# Altium schematic symbol library Dlib.SchLib: 73 symbols
Pins are listed as number, name and electrical type; pins without a type are passive.

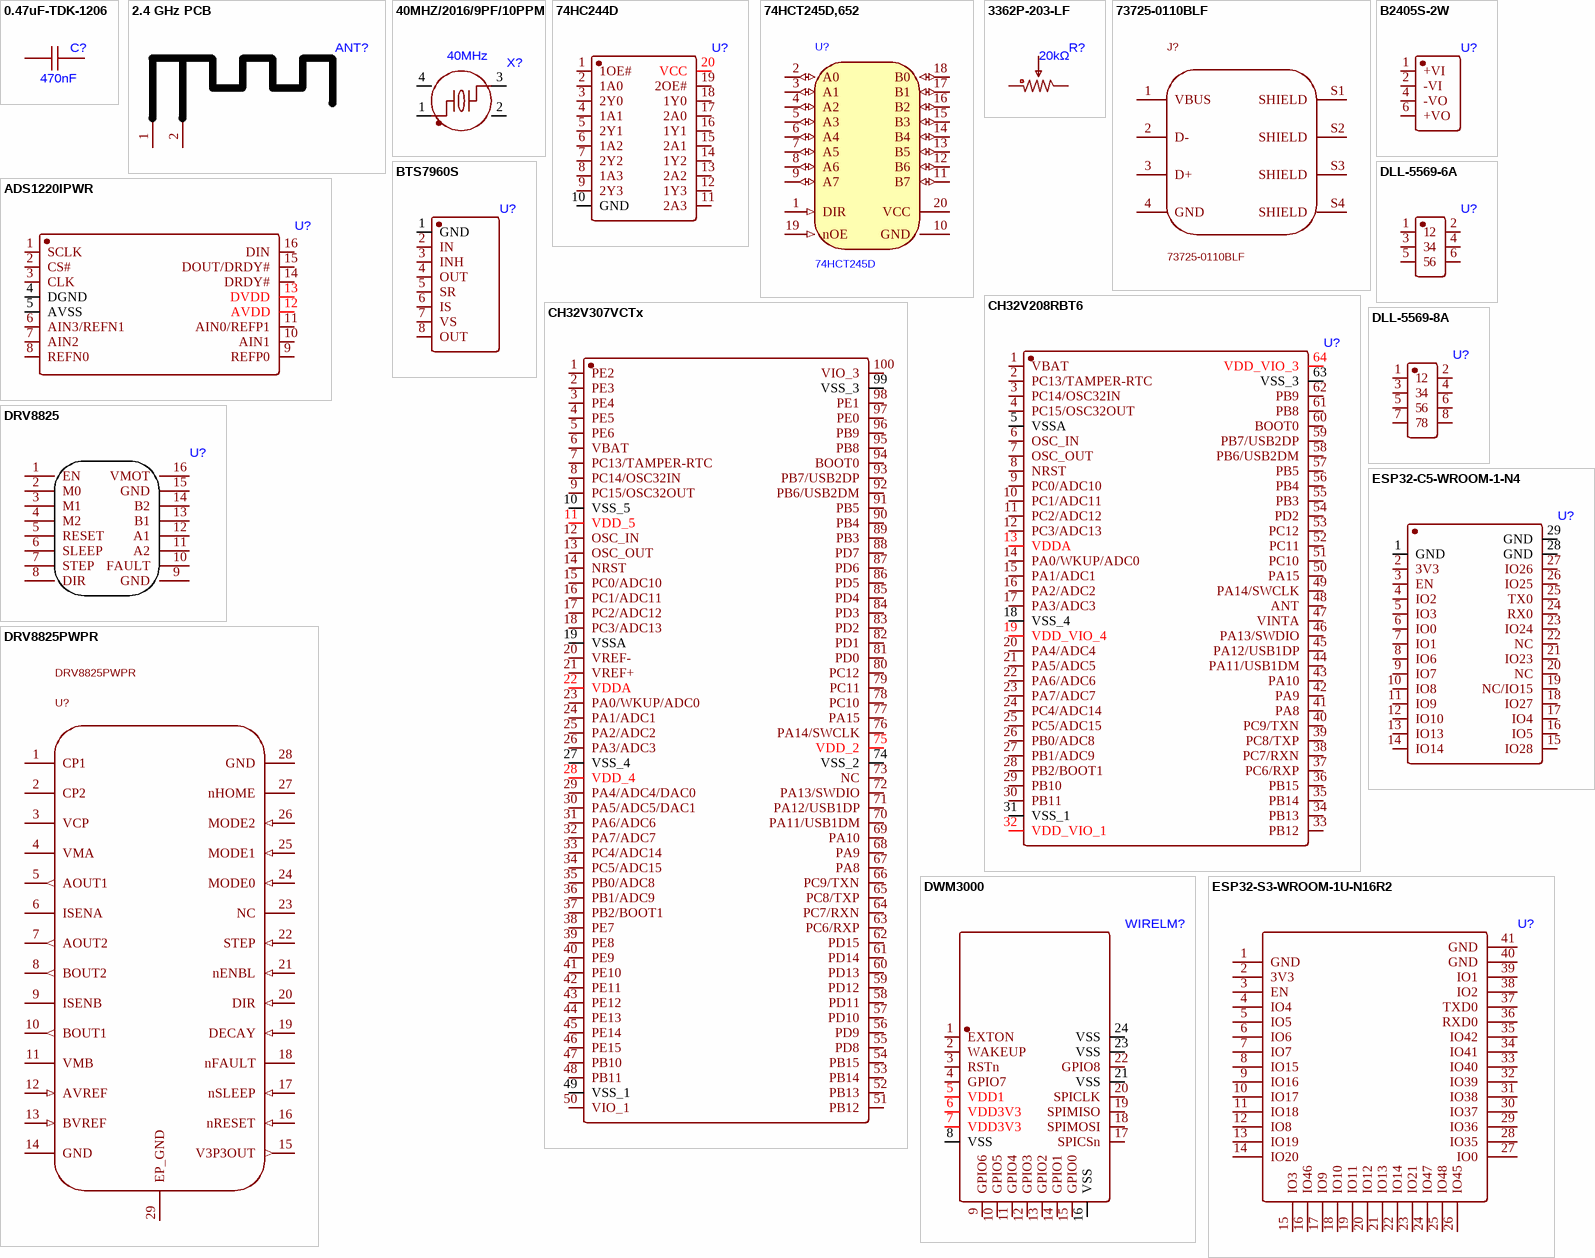
[diagram p0: symbols 0.47uF-TDK-1206 to ESP32-S3-WROOM-1U-N16R2]

## 0.47uF-TDK-1206
designator C?, comment 470nF
footprint C1206
pins: 1, 2

## 2.4 GHz PCB
designator ANT?
footprint 2.4 GHZ PCB ANTENA
pins: 1, 2

## 40MHZ/2016/9PF/10PPM
designator X?, comment 40MHz
footprint CRYSTAL-SMD_4P-L2.0-W1.6-BL
pins: 1, 2 GND, 3, 4 GND

## 74HC244D
designator U?
footprint SOIC-20_L12.8-W7.5-P1.27-LS10.3-TL
pins: 1 1OE#, 2 1A0, 3 2Y0, 4 1A1, 5 2Y1, 6 1A2, 7 2Y2, 8 1A3, 9 2Y3, 10 GND, 11 2A3, 12 1Y3, 13 2A2, 14 1Y2, 15 2A1, 16 1Y1, 17 2A0, 18 1Y0, 19 2OE#, 20 VCC

## 74HCT245D,652
designator U?, comment 74HCT245D
Nexperia 74HCT245D,652; 8-bit bidirectional non-inverting bus transceiver, 3-state, TTL inputs, SO20 wide; Logic Family: 74HCT; TTL-compatible inputs; Supply Voltage: 4.5-5.5 V; Function: 8-bit non-inverting bidirectional bus transceiver; 3-state; Direction: DIR=HIGH: A to B; DIR=LOW: B to A; nOE=HIGH: high impedance; 3D Model: Existing embedded SOIC-20 wide model shared with 74HC244D; Package Body: 12.8 x 7.5 mm; pitch 1.27 mm; Manufacturer: Nexperia; Manufacturer Part Number: 74HCT245D,652; Package: SO20 / SOIC-20 wide / SOT163-1; Datasheet: https://assets.nexperia.com/documents/data-sheet/74HC_HCT245.pdf; ComponentLink1Description: Nexperia datasheet; ComponentLink1URL: https://assets.nexperia.com/documents/data-sheet/74HC_HCT245.pdf; Product URL: https://www.thegioiic.com/74hct245d-652-ic-bus-transceiver-non-inverting-8-bit-3-state-20-soic
footprint SOIC-20_L12.8-W7.5-P1.27-LS10.3-TL
pins: 1 DIR (in), 2 A0 (io), 3 A1 (io), 4 A2 (io), 5 A3 (io), 6 A4 (io), 7 A5 (io), 8 A6 (io), 9 A7 (io), 10 GND (power), 11 B7 (io), 12 B6 (io), 13 B5 (io), 14 B4 (io), 15 B3 (io), 16 B2 (io), 17 B1 (io), 18 B0 (io), 19 nOE (in), 20 VCC (power)

## 3362P-203-LF
designator R?, comment 20kΩ
footprint RES-ADJ-TH_3P-L7.0-W6.8_3362P
pins: 1, 2, 3

## 73725-0110BLF
designator J?
USB 2.0 Type-A receptacle, upright right-angle, through-hole, 4 contacts and 4 shield stakes; Manufacturer: Amphenol Communications Solutions (FCI); USB Version: USB 2.0 Type A receptacle; Contact Tail Length: 2.29 mm; Recommended PCB Thickness: 1.00-1.60 mm; Shield Pads: S1-S4 are four electrically common shell stakes; library-assigned labels; Application Note: Exact footprint for 73725-0110BLF. Photo similarity does not establish interchangeability. No PCB edge cut is included.; Manufacturer Part Number: 73725-0110BLF; Package: USB-A upright right-angle through-hole; Datasheet: https://cdn.amphenol-cs.com/media/wysiwyg/files/drawing/73725.pdf; ComponentLink1Description: Amphenol drawing 73725 Rev AL1, sheet 2; ComponentLink1URL: https://cdn.amphenol-cs.com/media/wysiwyg/files/drawing/73725.pdf; Product URL: https://www.amphenol-cs.com/product/737250110blf.html; Mounting: Upright / right-angle / THT / hold-down style A; Housing: White; without sensor contact; Footprint Origin: Center between front shell stakes; connector mating face at Y=-11.76 mm
footprint USB_A_UPRIGHT_73725-0110BLF
pins: 1 VBUS, 2 D-, 3 D+, 4 GND, S1 SHIELD, S2 SHIELD, S3 SHIELD, S4 SHIELD

## ADS1220IPWR
designator U?
footprint TSSOP-16_L5.0-W4.4-P0.65-LS6.4-BL
pins: 1 SCLK, 2 CS#, 3 CLK, 4 DGND, 5 AVSS, 6 AIN3/REFN1, 7 AIN2, 8 REFN0, 9 REFP0, 10 AIN1, 11 AIN0/REFP1, 12 AVDD, 13 DVDD, 14 DRDY#, 15 DOUT/DRDY#, 16 DIN

## B2405S-2W
designator U?
footprint PWRM-TH_IB2405S-2W
pins: 1 +VI, 2 -VI, 4 -VO, 6 +VO

## BTS7960S
designator U?
footprint PG-TO263-7_L9.9-W9.2-P1.27-LS14.9-BR
pins: 1 GND, 2 IN, 3 INH, 4 OUT, 5 SR, 6 IS, 7 VS, 8 OUT

## CH32V208RBT6
designator U?
footprint LQFP-64_L10.0-W10.0-P0.50-LS12.0-BL
pins: 1 VBAT, 2 PC13/TAMPER-RTC, 3 PC14/OSC32IN, 4 PC15/OSC32OUT, 5 VSSA, 6 OSC_IN, 7 OSC_OUT, 8 NRST, 9 PC0/ADC10, 10 PC1/ADC11, 11 PC2/ADC12, 12 PC3/ADC13, 13 VDDA, 14 PA0/WKUP/ADC0, 15 PA1/ADC1, 16 PA2/ADC2, 17 PA3/ADC3, 18 VSS_4, 19 VDD_VIO_4, 20 PA4/ADC4, 21 PA5/ADC5, 22 PA6/ADC6, 23 PA7/ADC7, 24 PC4/ADC14, 25 PC5/ADC15, 26 PB0/ADC8, 27 PB1/ADC9, 28 PB2/BOOT1, 29 PB10, 30 PB11, 31 VSS_1, 32 VDD_VIO_1, 33 PB12, 34 PB13, 35 PB14, 36 PB15, 37 PC6/RXP, 38 PC7/RXN, 39 PC8/TXP, 40 PC9/TXN, 41 PA8, 42 PA9, 43 PA10, 44 PA11/USB1DM, 45 PA12/USB1DP, 46 PA13/SWDIO, 47 VINTA, 48 ANT, 49 PA14/SWCLK, 50 PA15, 51 PC10, 52 PC11, 53 PC12, 54 PD2, 55 PB3, 56 PB4, 57 PB5, 58 PB6/USB2DM, 59 PB7/USB2DP, 60 BOOT0, 61 PB8, 62 PB9, 63 VSS_3, 64 VDD_VIO_3

## CH32V307VCTx
designator U?
footprint LQFP-100_L14.0-W14.0-P0.50-LS16.0-BL
pins: 1 PE2, 2 PE3, 3 PE4, 4 PE5, 5 PE6, 6 VBAT, 7 PC13/TAMPER-RTC, 8 PC14/OSC32IN, 9 PC15/OSC32OUT, 10 VSS_5, 11 VDD_5, 12 OSC_IN, 13 OSC_OUT, 14 NRST, 15 PC0/ADC10, 16 PC1/ADC11, 17 PC2/ADC12, 18 PC3/ADC13, 19 VSSA, 20 VREF-, 21 VREF+, 22 VDDA, 23 PA0/WKUP/ADC0, 24 PA1/ADC1, 25 PA2/ADC2, 26 PA3/ADC3, 27 VSS_4, 28 VDD_4, 29 PA4/ADC4/DAC0, 30 PA5/ADC5/DAC1, 31 PA6/ADC6, 32 PA7/ADC7, 33 PC4/ADC14, 34 PC5/ADC15, 35 PB0/ADC8, 36 PB1/ADC9, 37 PB2/BOOT1, 38 PE7, 39 PE8, 40 PE9, 41 PE10, 42 PE11, 43 PE12, 44 PE13, 45 PE14, 46 PE15, 47 PB10, 48 PB11, 49 VSS_1, 50 VIO_1, 51 PB12, 52 PB13, 53 PB14, 54 PB15, 55 PD8, 56 PD9, 57 PD10, 58 PD11, 59 PD12, 60 PD13, 61 PD14, 62 PD15, 63 PC6/RXP, 64 PC7/RXN, 65 PC8/TXP, 66 PC9/TXN, 67 PA8, 68 PA9, 69 PA10, 70 PA11/USB1DM, 71 PA12/USB1DP, 72 PA13/SWDIO, 73 NC, 74 VSS_2, 75 VDD_2, 76 PA14/SWCLK, 77 PA15, 78 PC10, 79 PC11, 80 PC12, 81 PD0, 82 PD1, 83 PD2, 84 PD3, 85 PD4, 86 PD5, 87 PD6, 88 PD7, 89 PB3, 90 PB4, 91 PB5, 92 PB6/USB2DM, 93 PB7/USB2DP, 94 BOOT0, 95 PB8, 96 PB9, 97 PE0, 98 PE1, 99 VSS_3, 100 VIO_3

## DLL-5569-6A
designator U?
footprint CONN-TH_DLL-5569-6A
pins: 1, 2, 3, 4, 5, 6

## DLL-5569-8A
designator U?
footprint CONN-TH_DLL-5569-8A
pins: 1, 2, 3, 4, 5, 6, 7, 8

## DRV8825
designator U?
footprint DRV8825
footprint DRV8825
pins: 1 EN, 2 M0, 3 M1, 4 M2, 5 RESET, 6 SLEEP, 7 STEP, 8 DIR, 9 GND, 10 FAULT, 11 A2, 12 A1, 13 B1, 14 B2, 15 GND, 16 VMOT

## DRV8825PWPR
designator U?
Manufacturer: Texas Instruments; Supply Voltage: 8.2-45 V; Maximum Drive Current: 2.5 A (thermal conditions apply); Thermal Pad: Pin 29 = exposed pad; connect to GND; add thermal vias in PCB layout; Manufacturer Part Number: DRV8825PWPR; Package: HTSSOP-28 PowerPAD (PWP); Datasheet: https://www.ti.com/lit/ds/symlink/drv8825.pdf; Supplier: The Gioi IC; Supplier URL: https://www.thegioiic.com/drv8825pwpr-ic-dieu-khien-dong-co-buoc-2-5a-28-htssop; Footprint Variants: Default PWP0028C; alternate PWP0028V. Match actual TI package variant.
footprint TI_PWP0028C_DRV8825
footprint TI_PWP0028V_DRV8825
pins: 1 CP1, 2 CP2, 3 VCP, 4 VMA (power), 5 AOUT1 (out), 6 ISENA, 7 AOUT2 (out), 8 BOUT2 (out), 9 ISENB, 10 BOUT1 (out), 11 VMB (power), 12 AVREF (in), 13 BVREF (in), 14 GND (power), 15 V3P3OUT (out), 16 nRESET (in), 17 nSLEEP (in), 18 nFAULT (oc), 19 DECAY (in), 20 DIR (in), 21 nENBL (in), 22 STEP (in), 23 NC, 24 MODE0 (in), 25 MODE1 (in), 26 MODE2 (in), 27 nHOME (oc), 28 GND (power), 29 EP_GND (power)

## DWM3000
designator WIRELM?
footprint WIRELM-SMD_DWM3000
pins: 1 EXTON, 2 WAKEUP, 3 RSTn, 4 GPIO7, 5 VDD1, 6 VDD3V3, 7 VDD3V3, 8 VSS, 9 GPIO6, 10 GPIO5, 11 GPIO4, 12 GPIO3, 13 GPIO2, 14 GPIO1, 15 GPIO0, 16 VSS, 17 SPICSn, 18 SPIMOSI, 19 SPIMISO, 20 SPICLK, 21 VSS, 22 GPIO8, 23 VSS, 24 VSS

## ESP32-C5-WROOM-1-N4
designator U?
footprint COMM-SMD_ESP32-C5-WROOM-1-N4
pins: 1 GND, 2 3V3, 3 EN, 4 IO2, 5 IO3, 6 IO0, 7 IO1, 8 IO6, 9 IO7, 10 IO8, 11 IO9, 12 IO10, 13 IO13, 14 IO14, 15 IO28, 16 IO5, 17 IO4, 18 IO27, 19 NC/IO15, 20 NC, 21 IO23, 22 NC, 23 IO24, 24 RX0, 25 TX0, 26 IO25, 27 IO26, 28 GND, 29 GND

## ESP32-S3-WROOM-1U-N16R2
designator U?
footprint WIRELM-SMD_ESP32-S3-WROOM-1U
pins: 1 GND, 2 3V3, 3 EN, 4 IO4, 5 IO5, 6 IO6, 7 IO7, 8 IO15, 9 IO16, 10 IO17, 11 IO18, 12 IO8, 13 IO19, 14 IO20, 15 IO3, 16 IO46, 17 IO9, 18 IO10, 19 IO11, 20 IO12, 21 IO13, 22 IO14, 23 IO21, 24 IO47, 25 IO48, 26 IO45, 27 IO0, 28 IO35, 29 IO36, 30 IO37, 31 IO38, 32 IO39, 33 IO40, 34 IO41, 35 IO42, 36 RXD0, 37 TXD0, 38 IO2, 39 IO1, 40 GND, 41 GND

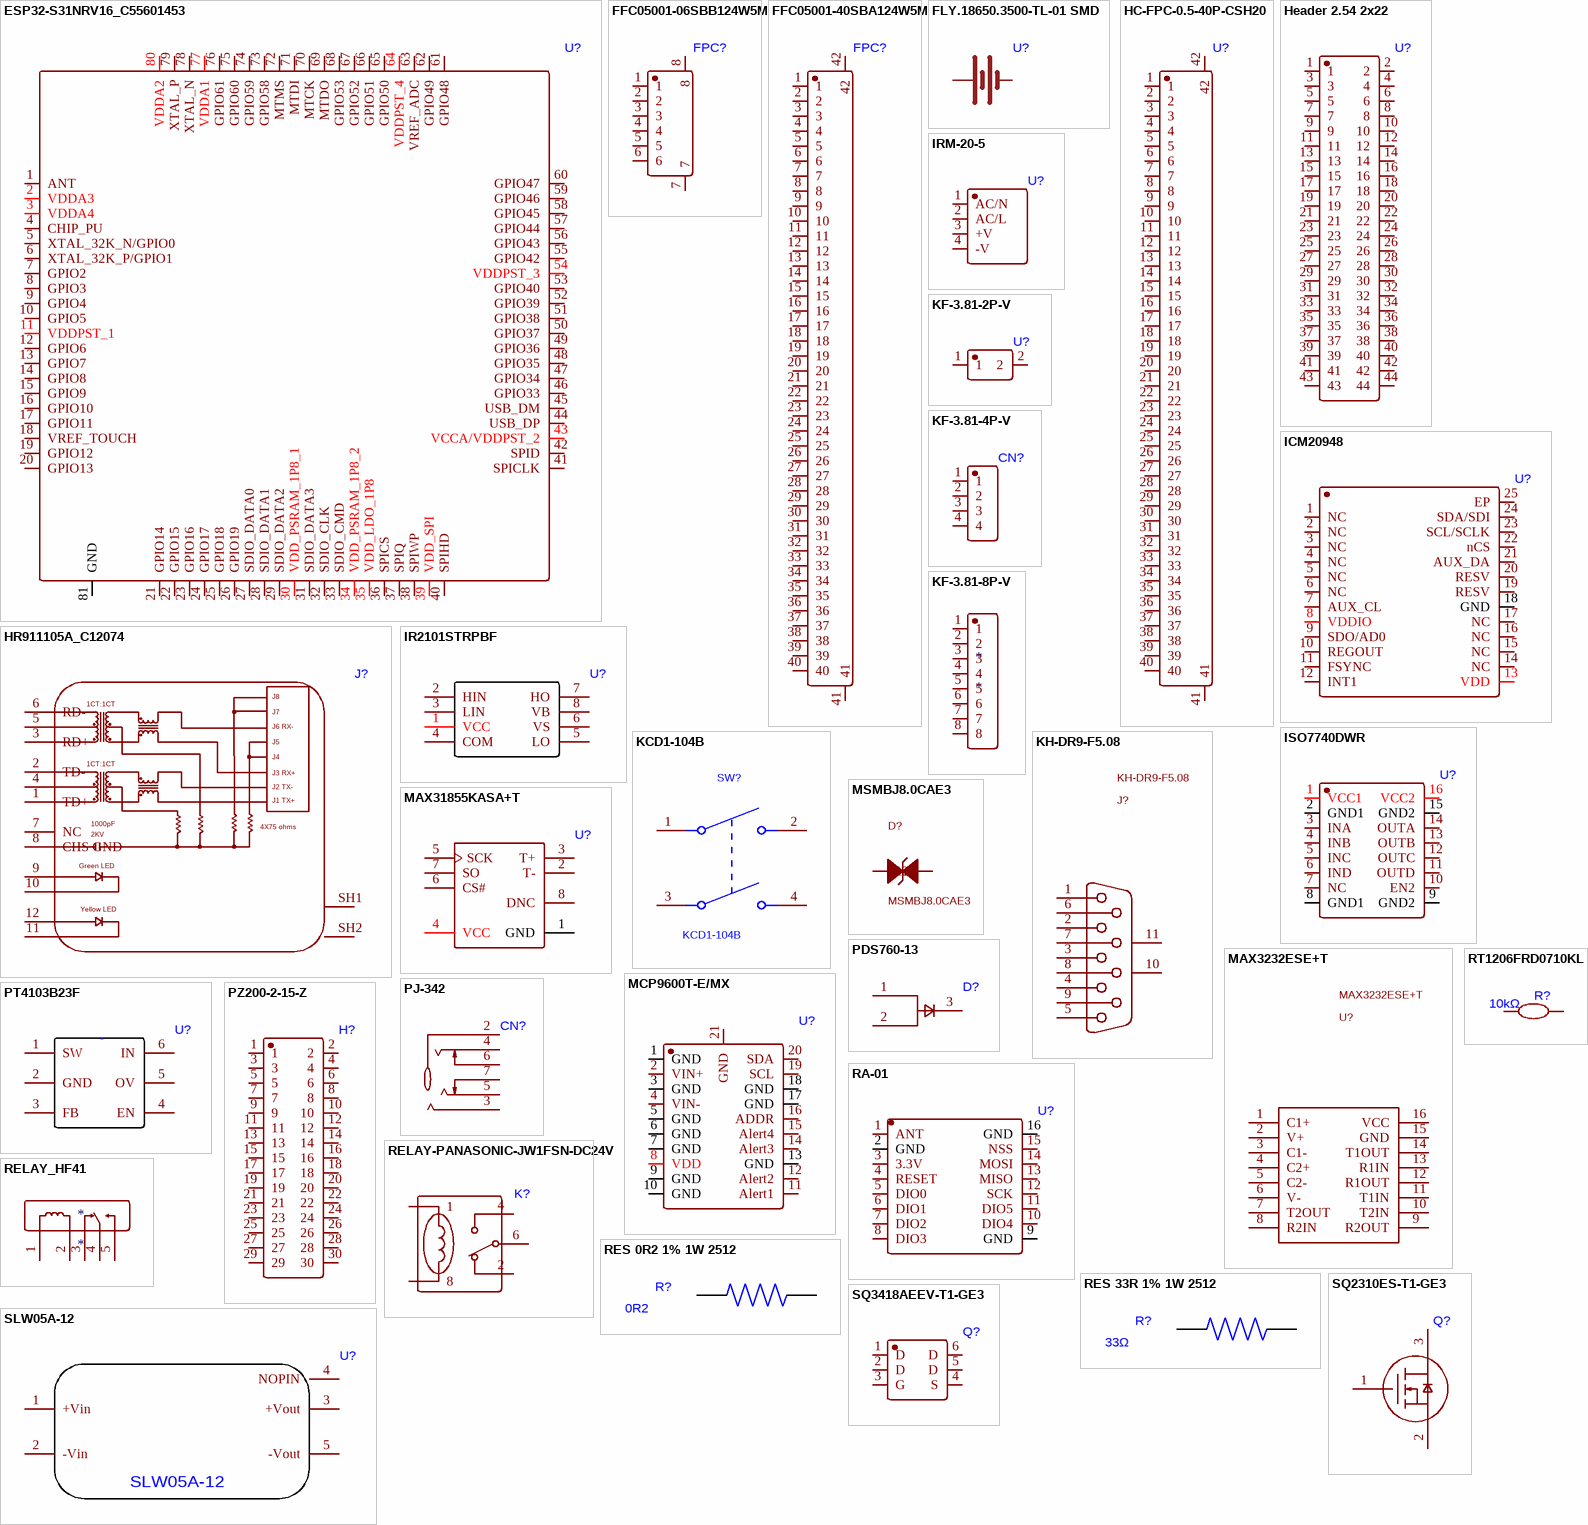
[diagram p1: symbols ESP32-S31NRV16_C55601453 to SQ3418AEEV-T1-GE3]

## ESP32-S31NRV16_C55601453
designator U?
footprint QFN-80_L8.0-W8.0-P0.35-BL-EP6.5
pins: 1 ANT, 2 VDDA3, 3 VDDA4, 4 CHIP_PU, 5 XTAL_32K_N/GPIO0, 6 XTAL_32K_P/GPIO1, 7 GPIO2, 8 GPIO3, 9 GPIO4, 10 GPIO5, 11 VDDPST_1, 12 GPIO6, 13 GPIO7, 14 GPIO8, 15 GPIO9, 16 GPIO10, 17 GPIO11, 18 VREF_TOUCH, 19 GPIO12, 20 GPIO13, 21 GPIO14, 22 GPIO15, 23 GPIO16, 24 GPIO17, 25 GPIO18, 26 GPIO19, 27 SDIO_DATA0, 28 SDIO_DATA1, 29 SDIO_DATA2, 30 VDD_PSRAM_1P8_1, 31 SDIO_DATA3, 32 SDIO_CLK, 33 SDIO_CMD, 34 VDD_PSRAM_1P8_2, 35 VDD_LDO_1P8, 36 SPICS, 37 SPIQ, 38 SPIWP, 39 VDD_SPI, 40 SPIHD, 41 SPICLK, 42 SPID, 43 VCCA/VDDPST_2, 44 USB_DP, 45 USB_DM, 46 GPIO33, 47 GPIO34, 48 GPIO35, 49 GPIO36, 50 GPIO37, 51 GPIO38, 52 GPIO39, 53 GPIO40, 54 VDDPST_3, 55 GPIO42, 56 GPIO43, 57 GPIO44, 58 GPIO45, 59 GPIO46, 60 GPIO47, 61 GPIO48, 62 GPIO49, 63 VREF_ADC, 64 VDDPST_4, 65 GPIO50, 66 GPIO51, 67 GPIO52, 68 GPIO53, 69 MTDO, 70 MTCK, 71 MTDI, 72 MTMS, 73 GPIO58, 74 GPIO59, 75 GPIO60, 76 GPIO61, 77 VDDA1, 78 XTAL_N, 79 XTAL_P, 80 VDDA2, 81 GND

## FFC05001-06SBB124W5M
designator FPC?
footprint FFC-SMD_FFC05001-06SBB124W5M
pins: 1, 2, 3, 4, 5, 6, 7, 8

## FFC05001-40SBA124W5M
designator FPC?
footprint FFC-SMD_FFC05001-40SBA124W5M
pins: 1, 2, 3, 4, 5, 6, 7, 8, 9, 10, 11, 12, 13, 14, 15, 16, 17, 18, 19, 20, 21, 22, 23, 24, 25, 26, 27, 28, 29, 30, 31, 32, 33, 34, 35, 36, 37, 38, 39, 40, 41, 42

## FLY.18650.3500-TL-01 SMD
designator U?
footprint BAT-SMD_FLY.18650.3500-TL-01
pins: 1 +, 2 -

## HC-FPC-0.5-40P-CSH20
designator U?
footprint FPC-SMD_40P-P0.50_HC-FPC-0.5-40P-CSH20
pins: 1, 2, 3, 4, 5, 6, 7, 8, 9, 10, 11, 12, 13, 14, 15, 16, 17, 18, 19, 20, 21, 22, 23, 24, 25, 26, 27, 28, 29, 30, 31, 32, 33, 34, 35, 36, 37, 38, 39, 40, 41, 42

## Header 2.54 2x22
designator U?
footprint HDR-TH_44P-P2.54-V-M-R2-C22-S2.54
pins: 1, 2, 3, 4, 5, 6, 7, 8, 9, 10, 11, 12, 13, 14, 15, 16, 17, 18, 19, 20, 21, 22, 23, 24, 25, 26, 27, 28, 29, 30, 31, 32, 33, 34, 35, 36, 37, 38, 39, 40, 41, 42, 43, 44

## HR911105A_C12074
designator J?
footprint RJ45-TH_HR911105A
pins: 1 TD+, 2 TD-, 3 RD+, 4, 5, 6 RD-, 7 NC, 8 CHS GND, 9, 10, 11, 12, SH1, SH2
text: J8; 1CT:1CT; J7; J6 RX-; J5; J4; J3 RX+; J2 TX-; J1 TX+; 1000pF; 4X75 ohms; 2KV; Green LED; Yellow LED

## ICM20948
designator U?
footprint QFN-24_L3.0-W3.0-P0.40-BL-EP
pins: 1 NC, 2 NC, 3 NC, 4 NC, 5 NC, 6 NC, 7 AUX_CL, 8 VDDIO, 9 SDO/AD0, 10 REGOUT, 11 FSYNC, 12 INT1, 13 VDD, 14 NC, 15 NC, 16 NC, 17 NC, 18 GND, 19 RESV, 20 RESV, 21 AUX_DA, 22 nCS, 23 SCL/SCLK, 24 SDA/SDI, 25 EP

## IR2101STRPBF
designator U?
footprint SOIC-8_L5.0-W4.0-P1.27-LS6.0-BL
pins: 1 VCC, 2 HIN, 3 LIN, 4 COM, 5 LO, 6 VS, 7 HO, 8 VB

## IRM-20-5
designator U?
footprint PWRM-TH_IRM-20-XX
pins: 1 AC/N, 2 AC/L, 3 +V, 4 -V

## ISO7740DWR
designator U?
footprint SOIC-16_L10.3-W7.5-P1.27-LS10.3-BL
pins: 1 VCC1, 2 GND1, 3 INA, 4 INB, 5 INC, 6 IND, 7 NC, 8 GND1, 9 GND2, 10 EN2, 11 OUTD, 12 OUTC, 13 OUTB, 14 OUTA, 15 GND2, 16 VCC2

## KCD1-104B
designator SW?
KCD1-104B / KCD117, 4-pin DPST ON-OFF right-angle rocker; simplified visual 3D; Manufacturer: Generic / OEM; Function: DPST ON-OFF, non-illuminated; 3D Model: Simplified similar-shape CAD; not manufacturer CAD; Pin Assignment: Library assigned: contacts 1-2 and 3-4, mechanically linked; verify actual switch continuity; Reference Terminal Grid: 10 x 5 mm; Reference Bezel: 21 x 15 mm; Part Number: KCD1-104B / KCD117; Product URL: https://www.thegioiic.com/kcd1-104b-kcd117-cong-tac-bap-benh-on-off-mau-den-4-chan-cong-6a; Footprint Status: Visual reference only; OEM geometry and pin assignment not verified
footprint KCD1_104B_4PIN_RA_VISUAL_REF
pins: 1 A1, 2 A2, 3 B1, 4 B2

## KF-3.81-2P-V
designator U?
footprint CONN-TH_P3.81_KF128L-3.81-2P-1 - duplicate1
pins: 1, 2

## KF-3.81-4P-V
designator CN?
footprint CONN-TH_4P-P3.81_DB2EVC-3.81-4P
pins: 1, 2, 3, 4

## KF-3.81-8P-V
designator *
footprint CONN-TH_8P-P3.81_15EDGR3.81-8P
pins: 1, 2, 3, 4, 5, 6, 7, 8

## KH-DR9-F5.08
designator J?
Manufacturer: kinghelm(); LCSC: C4943312; Source: JLCEDA/EasyEDA Official Library https://easyeda.com https://lceda.cn
footprint DB9-TH_KH-DR9-F5.08
pins: 1, 2, 3, 4, 5, 6, 7, 8, 9, 10 MH1, 11 MH2

## MAX3232ESE+T
designator U?
Manufacturer: ADI()/MAXIM(); LCSC: C15846; Source: JLCEDA/EasyEDA Official Library https://easyeda.com https://lceda.cn
footprint SOIC-16_L9.9-W3.9-P1.27-LS6.0-BL
pins: 1 C1+, 2 V+, 3 C1-, 4 C2+, 5 C2-, 6 V-, 7 T2OUT, 8 R2IN, 9 R2OUT, 10 T2IN, 11 T1IN, 12 R1OUT, 13 R1IN, 14 T1OUT, 15 GND, 16 VCC

## MAX31855KASA+T
designator U?
footprint SO-8_L4.9-W3.9-P1.27-LS5.9-BL
pins: 1 GND, 2 T-, 3 T+, 4 VCC, 5 SCK, 6 CS#, 7 SO, 8 DNC

## MCP9600T-E/MX
designator U?
footprint QFN-20_L5.0-W5.0-P0.65-BL-EP3.3
pins: 1 GND, 2 VIN+, 3 GND, 4 VIN-, 5 GND, 6 GND, 7 GND, 8 VDD, 9 GND, 10 GND, 11 Alert1, 12 Alert2, 13 GND, 14 Alert3, 15 Alert4, 16 ADDR, 17 GND, 18 GND, 19 SCL, 20 SDA, 21 GND

## MSMBJ8.0CAE3
designator D?
Bidirectional 600 W TVS, 8 V stand-off, SMB DO-214AA; Manufacturer: Microchip Technology; Working Standoff Voltage: 8 V; Breakdown Voltage: 8.89-9.83 V at 1 mA; Clamping Voltage: 13.6 V max at 44.1 A (10/1000 us); Peak Pulse Power: 600 W (10/1000 us; not continuous); Polarity: Bidirectional; terminals interchangeable; Application Note: Not suitable for RS-232 input signals reaching +/-12 V; verify line amplitude and capacitance before use.; Manufacturer Part Number: MSMBJ8.0CAE3; Package: SMB / DO-214AA; Datasheet: https://ww1.microchip.com/downloads/aemDocuments/documents/HRDS/ProductDocuments/DataSheets/RF01000%2B(3).pdf; ComponentLink1Description: Microchip datasheet; ComponentLink1URL: https://ww1.microchip.com/downloads/aemDocuments/documents/HRDS/ProductDocuments/DataSheets/RF01000%2B(3).pdf
footprint MICROCHIP_SMBJ_DO214AA_BIDIR
pins: 1, 2

## PDS760-13
designator D?
footprint POWERDI-5_L5.4-W4.0-LS6.5-RD
pins: 1 LEFT, 2 RIGHT, 3 BOT

## PJ-342
designator CN?
footprint AUDIO-SMD_PJ-342
pins: 2, 3, 4, 5, 6, 7

## PT4103B23F
designator U?, comment -
footprint SOT-23-6_L2.9-W1.6-P0.95-LS2.8-BR
pins: 1 SW, 2 GND, 3 FB, 4 EN, 5 OV, 6 IN

## PZ200-2-15-Z
designator H?
footprint HDR-TH_30P-P2.00-V-M-R2-C15-S2.00
pins: 1, 2, 3, 4, 5, 6, 7, 8, 9, 10, 11, 12, 13, 14, 15, 16, 17, 18, 19, 20, 21, 22, 23, 24, 25, 26, 27, 28, 29, 30

## RA-01
designator U?
footprint WIRELM-SMD_RA-01
pins: 1 ANT, 2 GND, 3 3.3V, 4 RESET, 5 DIO0, 6 DIO1, 7 DIO2, 8 DIO3, 9 GND, 10 DIO4, 11 DIO5, 12 SCK, 13 MISO, 14 MOSI, 15 NSS, 16 GND

## RELAY-PANASONIC-JW1FSN-DC24V
designator K?
footprint RELAY-TH_JW1FSN-DCXXX
pins: 1, 2, 4, 6, 8

## RELAY_HF41
designator *
footprint RELAY-TH_HF41F-24-ZS
pins: 1 COIL, 2 COIL, 3 NC, 4 COM, 5 NO

## RES 0R2 1% 1W 2512
designator R?, comment 0R2
Resistance: 0.2 ohm; Tolerance: 1%; Power: 1 W; Package: 2512; Part Type: Generic current-sense resistor; choose actual part meeting value, power and footprint
footprint R2512
pins: 1, 2

## RES 33R 1% 1W 2512
designator R?, comment 33Ω
footprint R2512
pins: 1, 2

## RT1206FRD0710KL
designator R?, comment 10kΩ
footprint R1206
pins: 1, 2

## SLW05A-12
designator U?
footprint SLW05A-12
pins: 1 +Vin, 2 -Vin, 3 +Vout, 4 NOPIN, 5 -Vout

## SQ2310ES-T1-GE3
designator Q?
footprint SOT-23_L2.9-W1.3-P1.90-LS2.4-BR
pins: 1 G, 2 S, 3 D

## SQ3418AEEV-T1-GE3
designator Q?
footprint TSOP-6_L3.0-W1.5-P0.95-LS2.8-BR
pins: 1 D, 2 D, 3 G, 4 S, 5 D, 6 D

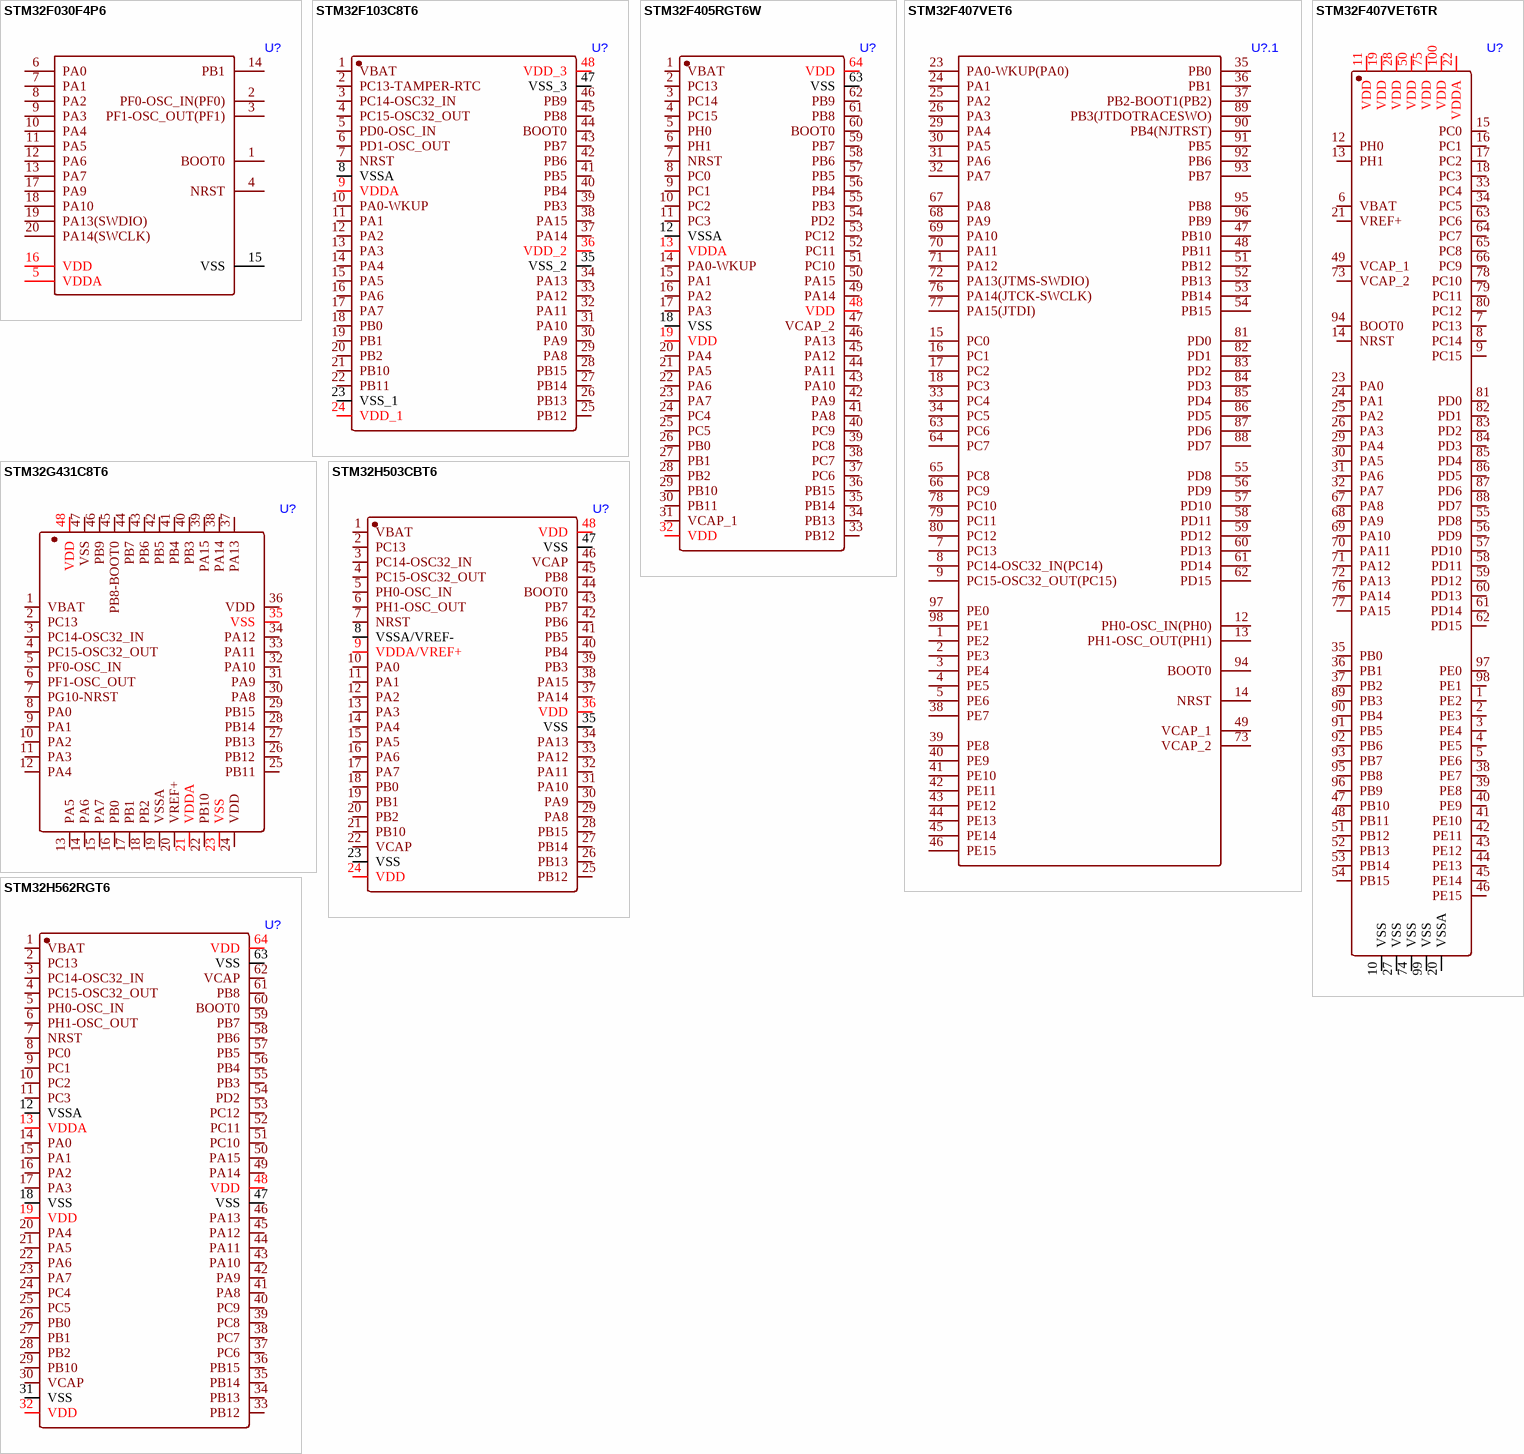
[diagram p2: symbols STM32F030F4P6 to STM32H562RGT6]

## STM32F030F4P6
designator U?
footprint TSSOP-20_L6.5-W4.4-P0.65-LS6.4-BL
pins: 1 BOOT0, 2 PF0-OSC_IN(PF0), 3 PF1-OSC_OUT(PF1), 4 NRST, 5 VDDA, 6 PA0, 7 PA1, 8 PA2, 9 PA3, 10 PA4, 11 PA5, 12 PA6, 13 PA7, 14 PB1, 15 VSS, 16 VDD, 17 PA9, 18 PA10, 19 PA13(SWDIO), 20 PA14(SWCLK)

## STM32F103C8T6
designator U?
footprint LQFP-48_L7.0-W7.0-P0.50-LS9.0-BL
pins: 1 VBAT, 2 PC13-TAMPER-RTC, 3 PC14-OSC32_IN, 4 PC15-OSC32_OUT, 5 PD0-OSC_IN, 6 PD1-OSC_OUT, 7 NRST, 8 VSSA, 9 VDDA, 10 PA0-WKUP, 11 PA1, 12 PA2, 13 PA3, 14 PA4, 15 PA5, 16 PA6, 17 PA7, 18 PB0, 19 PB1, 20 PB2, 21 PB10, 22 PB11, 23 VSS_1, 24 VDD_1, 25 PB12, 26 PB13, 27 PB14, 28 PB15, 29 PA8, 30 PA9, 31 PA10, 32 PA11, 33 PA12, 34 PA13, 35 VSS_2, 36 VDD_2, 37 PA14, 38 PA15, 39 PB3, 40 PB4, 41 PB5, 42 PB6, 43 PB7, 44 BOOT0, 45 PB8, 46 PB9, 47 VSS_3, 48 VDD_3

## STM32F405RGT6W
designator U?
footprint LQFP-64_L10.0-W10.0-P0.50-LS12.0-BL
pins: 1 VBAT, 2 PC13, 3 PC14, 4 PC15, 5 PH0, 6 PH1, 7 NRST, 8 PC0, 9 PC1, 10 PC2, 11 PC3, 12 VSSA, 13 VDDA, 14 PA0-WKUP, 15 PA1, 16 PA2, 17 PA3, 18 VSS, 19 VDD, 20 PA4, 21 PA5, 22 PA6, 23 PA7, 24 PC4, 25 PC5, 26 PB0, 27 PB1, 28 PB2, 29 PB10, 30 PB11, 31 VCAP_1, 32 VDD, 33 PB12, 34 PB13, 35 PB14, 36 PB15, 37 PC6, 38 PC7, 39 PC8, 40 PC9, 41 PA8, 42 PA9, 43 PA10, 44 PA11, 45 PA12, 46 PA13, 47 VCAP_2, 48 VDD, 49 PA14, 50 PA15, 51 PC10, 52 PC11, 53 PC12, 54 PD2, 55 PB3, 56 PB4, 57 PB5, 58 PB6, 59 PB7, 60 BOOT0, 61 PB8, 62 PB9, 63 VSS, 64 VDD

## STM32F407VET6
designator U?.1
footprint LQFP-100_L14.0-W14.0-P0.50-LS16.0-BL
pins: 1 PE2, 2 PE3, 3 PE4, 4 PE5, 5 PE6, 7 PC13, 8 PC14-OSC32_IN(PC14), 9 PC15-OSC32_OUT(PC15), 12 PH0-OSC_IN(PH0), 13 PH1-OSC_OUT(PH1), 14 NRST, 15 PC0, 16 PC1, 17 PC2, 18 PC3, 23 PA0-WKUP(PA0), 24 PA1, 25 PA2, 26 PA3, 29 PA4, 30 PA5, 31 PA6, 32 PA7, 33 PC4, 34 PC5, 35 PB0, 36 PB1, 37 PB2-BOOT1(PB2), 38 PE7, 39 PE8, 40 PE9, 41 PE10, 42 PE11, 43 PE12, 44 PE13, 45 PE14, 46 PE15, 47 PB10, 48 PB11, 49 VCAP_1, 51 PB12, 52 PB13, 53 PB14, 54 PB15, 55 PD8, 56 PD9, 57 PD10, 58 PD11, 59 PD12, 60 PD13, 61 PD14, 62 PD15, 63 PC6, 64 PC7, 65 PC8, 66 PC9, 67 PA8, 68 PA9, 69 PA10, 70 PA11, 71 PA12, 72 PA13(JTMS-SWDIO), 73 VCAP_2, 76 PA14(JTCK-SWCLK), 77 PA15(JTDI), 78 PC10, 79 PC11, 80 PC12, 81 PD0, 82 PD1, 83 PD2, 84 PD3, 85 PD4, 86 PD5, 87 PD6, 88 PD7, 89 PB3(JTDOTRACESWO), 90 PB4(NJTRST), 91 PB5, 92 PB6, 93 PB7, 94 BOOT0, 95 PB8, 96 PB9, 97 PE0, 98 PE1

## STM32F407VET6TR
designator U?
footprint LQFP-100_L14.0-W14.0-P0.50-LS16.0-BL
pins: 1 PE2, 2 PE3, 3 PE4, 4 PE5, 5 PE6, 6 VBAT, 7 PC13, 8 PC14, 9 PC15, 10 VSS, 11 VDD, 12 PH0, 13 PH1, 14 NRST, 15 PC0, 16 PC1, 17 PC2, 18 PC3, 19 VDD, 20 VSSA, 21 VREF+, 22 VDDA, 23 PA0, 24 PA1, 25 PA2, 26 PA3, 27 VSS, 28 VDD, 29 PA4, 30 PA5, 31 PA6, 32 PA7, 33 PC4, 34 PC5, 35 PB0, 36 PB1, 37 PB2, 38 PE7, 39 PE8, 40 PE9, 41 PE10, 42 PE11, 43 PE12, 44 PE13, 45 PE14, 46 PE15, 47 PB10, 48 PB11, 49 VCAP_1, 50 VDD, 51 PB12, 52 PB13, 53 PB14, 54 PB15, 55 PD8, 56 PD9, 57 PD10, 58 PD11, 59 PD12, 60 PD13, 61 PD14, 62 PD15, 63 PC6, 64 PC7, 65 PC8, 66 PC9, 67 PA8, 68 PA9, 69 PA10, 70 PA11, 71 PA12, 72 PA13, 73 VCAP_2, 74 VSS, 75 VDD, 76 PA14, 77 PA15, 78 PC10, 79 PC11, 80 PC12, 81 PD0, 82 PD1, 83 PD2, 84 PD3, 85 PD4, 86 PD5, 87 PD6, 88 PD7, 89 PB3, 90 PB4, 91 PB5, 92 PB6, 93 PB7, 94 BOOT0, 95 PB8, 96 PB9, 97 PE0, 98 PE1, 99 VSS, 100 VDD

## STM32G431C8T6
designator U?
footprint LQFP-48_L7.0-W7.0-P0.50-LS9.0-BL
pins: 1 VBAT, 2 PC13, 3 PC14-OSC32_IN, 4 PC15-OSC32_OUT, 5 PF0-OSC_IN, 6 PF1-OSC_OUT, 7 PG10-NRST, 8 PA0, 9 PA1, 10 PA2, 11 PA3, 12 PA4, 13 PA5, 14 PA6, 15 PA7, 16 PB0, 17 PB1, 18 PB2, 19 VSSA, 20 VREF+, 21 VDDA, 22 PB10, 23 VSS, 24 VDD, 25 PB11, 26 PB12, 27 PB13, 28 PB14, 29 PB15, 30 PA8, 31 PA9, 32 PA10, 33 PA11, 34 PA12, 35 VSS, 36 VDD, 37 PA13, 38 PA14, 39 PA15, 40 PB3, 41 PB4, 42 PB5, 43 PB6, 44 PB7, 45 PB8-BOOT0, 46 PB9, 47 VSS, 48 VDD

## STM32H503CBT6
designator U?
footprint LQFP-48_L7.0-W7.0-P0.50-LS9.0-BL
pins: 1 VBAT, 2 PC13, 3 PC14-OSC32_IN, 4 PC15-OSC32_OUT, 5 PH0-OSC_IN, 6 PH1-OSC_OUT, 7 NRST, 8 VSSA/VREF-, 9 VDDA/VREF+, 10 PA0, 11 PA1, 12 PA2, 13 PA3, 14 PA4, 15 PA5, 16 PA6, 17 PA7, 18 PB0, 19 PB1, 20 PB2, 21 PB10, 22 VCAP, 23 VSS, 24 VDD, 25 PB12, 26 PB13, 27 PB14, 28 PB15, 29 PA8, 30 PA9, 31 PA10, 32 PA11, 33 PA12, 34 PA13, 35 VSS, 36 VDD, 37 PA14, 38 PA15, 39 PB3, 40 PB4, 41 PB5, 42 PB6, 43 PB7, 44 BOOT0, 45 PB8, 46 VCAP, 47 VSS, 48 VDD

## STM32H562RGT6
designator U?
footprint LQFP-64_L10.0-W10.0-P0.50-LS12.0-TL
pins: 1 VBAT, 2 PC13, 3 PC14-OSC32_IN, 4 PC15-OSC32_OUT, 5 PH0-OSC_IN, 6 PH1-OSC_OUT, 7 NRST, 8 PC0, 9 PC1, 10 PC2, 11 PC3, 12 VSSA, 13 VDDA, 14 PA0, 15 PA1, 16 PA2, 17 PA3, 18 VSS, 19 VDD, 20 PA4, 21 PA5, 22 PA6, 23 PA7, 24 PC4, 25 PC5, 26 PB0, 27 PB1, 28 PB2, 29 PB10, 30 VCAP, 31 VSS, 32 VDD, 33 PB12, 34 PB13, 35 PB14, 36 PB15, 37 PC6, 38 PC7, 39 PC8, 40 PC9, 41 PA8, 42 PA9, 43 PA10, 44 PA11, 45 PA12, 46 PA13, 47 VSS, 48 VDD, 49 PA14, 50 PA15, 51 PC10, 52 PC11, 53 PC12, 54 PD2, 55 PB3, 56 PB4, 57 PB5, 58 PB6, 59 PB7, 60 BOOT0, 61 PB8, 62 VCAP, 63 VSS, 64 VDD

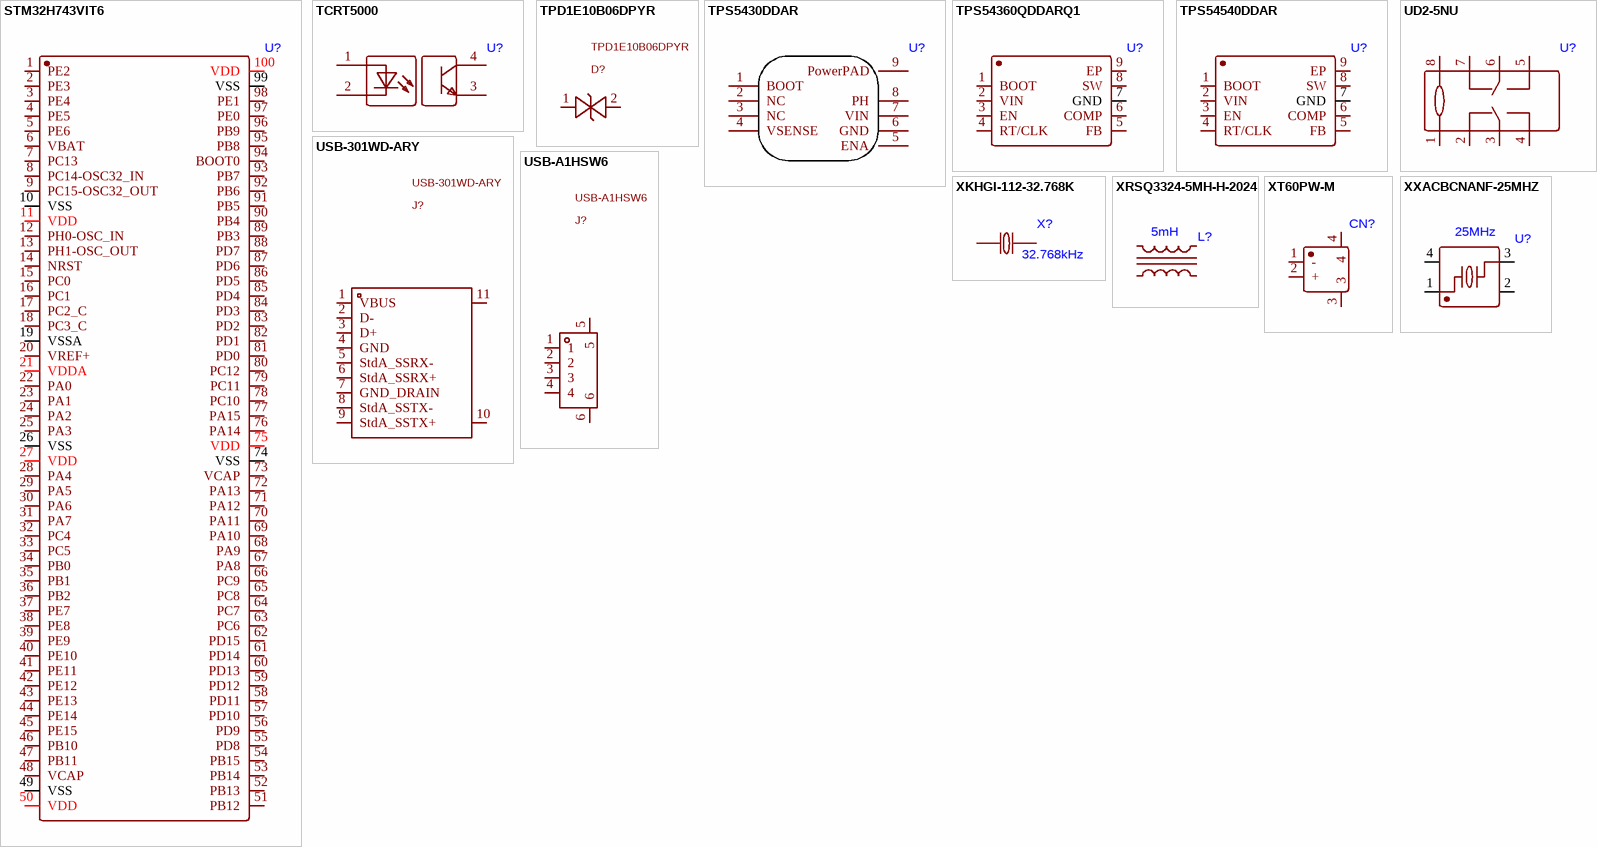
[diagram p3: symbols STM32H743VIT6 to XXACBCNANF-25MHZ]

## STM32H743VIT6
designator U?
footprint LQFP-100_L14.0-W14.0-P0.50-LS16.0-BL
pins: 1 PE2, 2 PE3, 3 PE4, 4 PE5, 5 PE6, 6 VBAT, 7 PC13, 8 PC14-OSC32_IN, 9 PC15-OSC32_OUT, 10 VSS, 11 VDD, 12 PH0-OSC_IN, 13 PH1-OSC_OUT, 14 NRST, 15 PC0, 16 PC1, 17 PC2_C, 18 PC3_C, 19 VSSA, 20 VREF+, 21 VDDA, 22 PA0, 23 PA1, 24 PA2, 25 PA3, 26 VSS, 27 VDD, 28 PA4, 29 PA5, 30 PA6, 31 PA7, 32 PC4, 33 PC5, 34 PB0, 35 PB1, 36 PB2, 37 PE7, 38 PE8, 39 PE9, 40 PE10, 41 PE11, 42 PE12, 43 PE13, 44 PE14, 45 PE15, 46 PB10, 47 PB11, 48 VCAP, 49 VSS, 50 VDD, 51 PB12, 52 PB13, 53 PB14, 54 PB15, 55 PD8, 56 PD9, 57 PD10, 58 PD11, 59 PD12, 60 PD13, 61 PD14, 62 PD15, 63 PC6, 64 PC7, 65 PC8, 66 PC9, 67 PA8, 68 PA9, 69 PA10, 70 PA11, 71 PA12, 72 PA13, 73 VCAP, 74 VSS, 75 VDD, 76 PA14, 77 PA15, 78 PC10, 79 PC11, 80 PC12, 81 PD0, 82 PD1, 83 PD2, 84 PD3, 85 PD4, 86 PD5, 87 PD6, 88 PD7, 89 PB3, 90 PB4, 91 PB5, 92 PB6, 93 PB7, 94 BOOT0, 95 PB8, 96 PB9, 97 PE0, 98 PE1, 99 VSS, 100 VDD

## TCRT5000
designator U?
footprint OPTO-TH_TCRT5000
pins: 1, 2, 3, 4

## TPD1E10B06DPYR
designator D?
Manufacturer: TI(); LCSC: C48260; Source: JLCEDA/EasyEDA Official Library https://easyeda.com https://lceda.cn
footprint X1SON-2_L1.0-W0.6-P0.65-BI-1
pins: 1, 2

## TPS5430DDAR
designator U?
footprint ESOP-8_L4.9-W3.9-P1.27-LS6.0-TL-EP
pins: 1 BOOT, 2 NC, 3 NC, 4 VSENSE, 5 ENA, 6 GND, 7 VIN, 8 PH, 9 PowerPAD

## TPS54360QDDARQ1
designator U?
footprint SOIC-8_L4.9-W3.9-P1.27-LS6.0-BL-EP
pins: 1 BOOT, 2 VIN, 3 EN, 4 RT/CLK, 5 FB, 6 COMP, 7 GND, 8 SW, 9 EP

## TPS54540DDAR
designator U?
footprint SOIC-8_L4.9-W3.9-P1.27-LS6.0-BL-EP
pins: 1 BOOT, 2 VIN, 3 EN, 4 RT/CLK, 5 FB, 6 COMP, 7 GND, 8 SW, 9 EP

## UD2-5NU
designator U?
footprint RELAY-SMD_KEMET_UD2-XXNU
pins: 1, 2, 3, 4, 5, 6, 7, 8

## USB-301WD-ARY
designator J?
Manufacturer: XUNPU(); LCSC: C2895025; Source: JLCEDA/EasyEDA Official Library https://easyeda.com https://lceda.cn
footprint USB-TH_XUNPU_USB-301WD-ARY
pins: 1 VBUS, 2 D-, 3 D+, 4 GND, 5 StdA_SSRX-, 6 StdA_SSRX+, 7 GND_DRAIN, 8 StdA_SSTX-, 9 StdA_SSTX+, 10 SHIELD, 11 SHIELD

## USB-A1HSW6
designator J?
Manufacturer: On-Shore Tech; LCSC: C3197959; Source: JLCEDA/EasyEDA Official Library https://easyeda.com https://lceda.cn
footprint USB-A-TH_USB-A1HSW6
pins: 1, 2, 3, 4, 5, 6

## XKHGI-112-32.768K
designator X?, comment 32.768kHz
footprint CRYSTAL-SMD_L2.0-W1.2
pins: 1, 2

## XRSQ3324-5MH-H-2024
designator L?, comment 5mH
footprint XFMR-TH_XRSQ3324-5MH-H-2024
pins: 1, 2, 3, 4

## XT60PW-M
designator CN?
footprint CONN-TH_XT60PW-M
pins: 1 -, 2 +, 3, 4

## XXACBCNANF-25MHZ
designator U?, comment 25MHz
footprint CRYSTAL-SMD_4P-L3.2-W2.5-BL
pins: 1, 2 GND, 3, 4 GND